# Altium integrated library SRN6045TA-100M.IntLib: 1 symbol
Pins are listed as number, name and electrical type; pins without a type are passive.

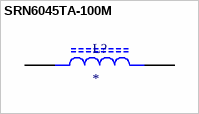
[diagram p0: symbol SRN6045TA-100M]

## SRN6045TA-100M
designator L?
Inductors, Fixed, 10uH 20% 2.6A shd SMD AEC-Q200 | Bourns SRN6045TA-100M; SnapEDA_Link: https://www.snapeda.com/parts/SRN6045TA-100M/Bourns/view-part/?ref=snap; Package: Nonstandard Bourns; Value: *; MF: Bourns; MP: SRN6045TA-100M; Check_prices: https://www.snapeda.com/parts/SRN6045TA-100M/Bourns/view-part/?ref=eda
footprint IND_SRN6045TA-100M
pins: 1, 2